# Altium footprint library LD3985M33R.PcbLib: 4 footprints
Each footprint in its own frame and in the unit in brackets; x right, y up, seen from the top. Pads: shape width x height; smd on the part's side, far side on the other; paste and mask are expansions set on the pad; w line width, h text height; cw(c..) or ccw(c..) is an arc to the next point about the centre after c.
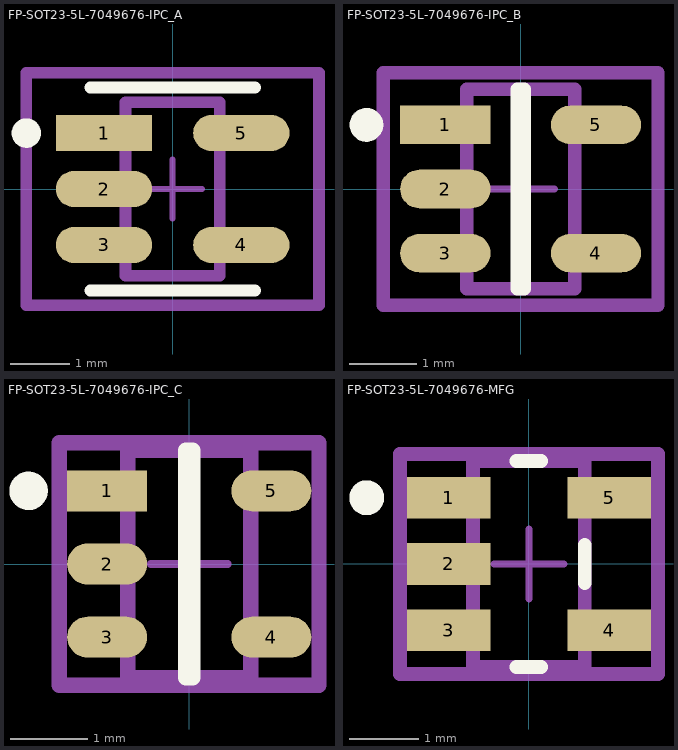
[diagram p0: the footprints below, top view; thin cyan lines are the x and y axes]

## FP-SOT23-5L-7049676-IPC_A [mil]
pads (5):
  rect 64.5x24.1 smd paste+0 mask+0: 1(-45.91,37.4)
  rrect100% 64.5x24.1 smd paste+0 mask+0: 2(-45.91,0) 3(-45.91,-37.4) 4(45.91,-37.4) 5(45.91,37.4)
Top Overlay:
  circle w9.84: c-97.85,37.4 r4.92
  lines w7.87: -55.12,-67.91 55.12,-67.91 ; -55.12,67.91 55.12,67.91
Top Assembly:
  lines w7.87: -97.85,-77.76 97.85,-77.76 97.85,77.76 -97.85,77.76 -97.85,-77.76
  text ".Designator" at 0,-0.02 h39.37
Top 3D Body:
  lines w7.87: -31.5,-58.07 31.5,-58.07 31.5,58.07 -31.5,58.07 -31.5,-58.07
Top Courtyard:
  lines w7.87: -97.85,-77.76 97.85,-77.76 97.85,77.76 -97.85,77.76 -97.85,-77.76
Top Component Center:
  lines w3.94: -19.68,0 19.68,0 ; 0,-19.68 0,19.68
3D body "IC_STMicroelectronics_LD3985M33R_eec.STEP": height 10, standoff 0, extent -97.85,-77.76 97.85,77.76

## FP-SOT23-5L-7049676-IPC_B [mm]
pads (5):
  rect 1.338x0.572 smd paste+0 mask+0: 1(-1.116,0.95)
  rrect100% 1.338x0.572 smd paste+0 mask+0: 2(-1.116,0) 3(-1.116,-0.95) 4(1.116,-0.95) 5(1.116,0.95)
Top Overlay:
  circle w0.25: c-2.285,0.95 r0.125
  lines w0.2: -0.053,-1.475 -0.053,1.475 0.053,1.475 0.053,-1.475 -0.053,-1.475
Top Assembly:
  lines w0.2: -2.035,-1.725 2.035,-1.725 2.035,1.725 -2.035,1.725 -2.035,-1.725
  text ".Designator" at 0,0.188 h1
Top 3D Body:
  lines w0.2: -0.8,-1.475 0.8,-1.475 0.8,1.475 -0.8,1.475 -0.8,-1.475
Top Courtyard:
  lines w0.2: -2.035,-1.725 2.035,-1.725 2.035,1.725 -2.035,1.725 -2.035,-1.725
Top Component Center:
  lines w0.1: -0.5,0 0.5,0 ; 0,-0.5 0,0.5
3D body "IC_STMicroelectronics_LD3985M33R_eec.STEP": height 0.25, standoff 0, extent -2.035,-1.725 2.035,1.725

## FP-SOT23-5L-7049676-IPC_C [mm]
pads (5):
  rect 1.038x0.532 smd paste+0 mask+0: 1(-1.066,0.95)
  rrect100% 1.038x0.532 smd paste+0 mask+0: 2(-1.066,0) 3(-1.066,-0.95) 4(1.066,-0.95) 5(1.066,0.95)
Top Overlay:
  circle w0.25: c-2.085,0.95 r0.125
  lines w0.2: -0.047,-1.475 0.047,-1.475 0.047,1.475 -0.047,1.475 -0.047,-1.475
Top Assembly:
  lines w0.2: -1.685,-1.575 1.685,-1.575 1.685,1.575 -1.685,1.575 -1.685,-1.575
  text ".Designator" at 0,0.188 h1
Top 3D Body:
  lines w0.2: -0.8,-1.475 0.8,-1.475 0.8,1.475 -0.8,1.475 -0.8,-1.475
Top Courtyard:
  lines w0.2: -1.685,-1.575 1.685,-1.575 1.685,1.575 -1.685,1.575 -1.685,-1.575
Top Component Center:
  lines w0.1: -0.5,0 0.5,0 ; 0,-0.5 0,0.5
3D body "IC_STMicroelectronics_LD3985M33R_eec.STEP": height 0.25, standoff 0, extent -1.685,-1.575 1.685,1.575

## FP-SOT23-5L-7049676-MFG [mm]
pads (5):
  rect 1.2x0.6 smd paste+0 mask+0: 1(-1.15,0.95) 2(-1.15,0) 3(-1.15,-0.95) 4(1.15,-0.95) 5(1.15,0.95)
Top Overlay:
  circle w0.25: c-2.325,0.95 r0.125
  lines w0.2: -0.175,-1.475 0.175,-1.475 ; -0.175,1.475 0.175,1.475 ; 0.8,-0.275 0.8,0.275
Top Assembly:
  lines w0.2: -1.85,-1.575 1.85,-1.575 1.85,1.575 -1.85,1.575 -1.85,-1.575
  text ".Designator" at 0,-0.001 h1
Top 3D Body:
  lines w0.2: -0.8,-1.475 0.8,-1.475 0.8,1.475 -0.8,1.475 -0.8,-1.475
Top Courtyard:
  lines w0.2: -1.85,-1.575 1.85,-1.575 1.85,1.575 -1.85,1.575 -1.85,-1.575
Top Component Center:
  lines w0.1: -0.5,0 0.5,0 ; 0,-0.5 0,0.5
3D body "IC_STMicroelectronics_LD3985M33R_eec.STEP": height 0.25, standoff 0, extent -1.85,-1.575 1.85,1.575